# Altium footprint library PcbLib1.PcbLib: 83 footprints (part 2 of 6)
Each footprint in its own frame and in the unit in brackets; x right, y up, seen from the top. Pads: shape width x height; smd on the part's side, far side on the other; paste and mask are expansions set on the pad; w line width, h text height; cw(c..) or ccw(c..) is an arc to the next point about the centre after c.
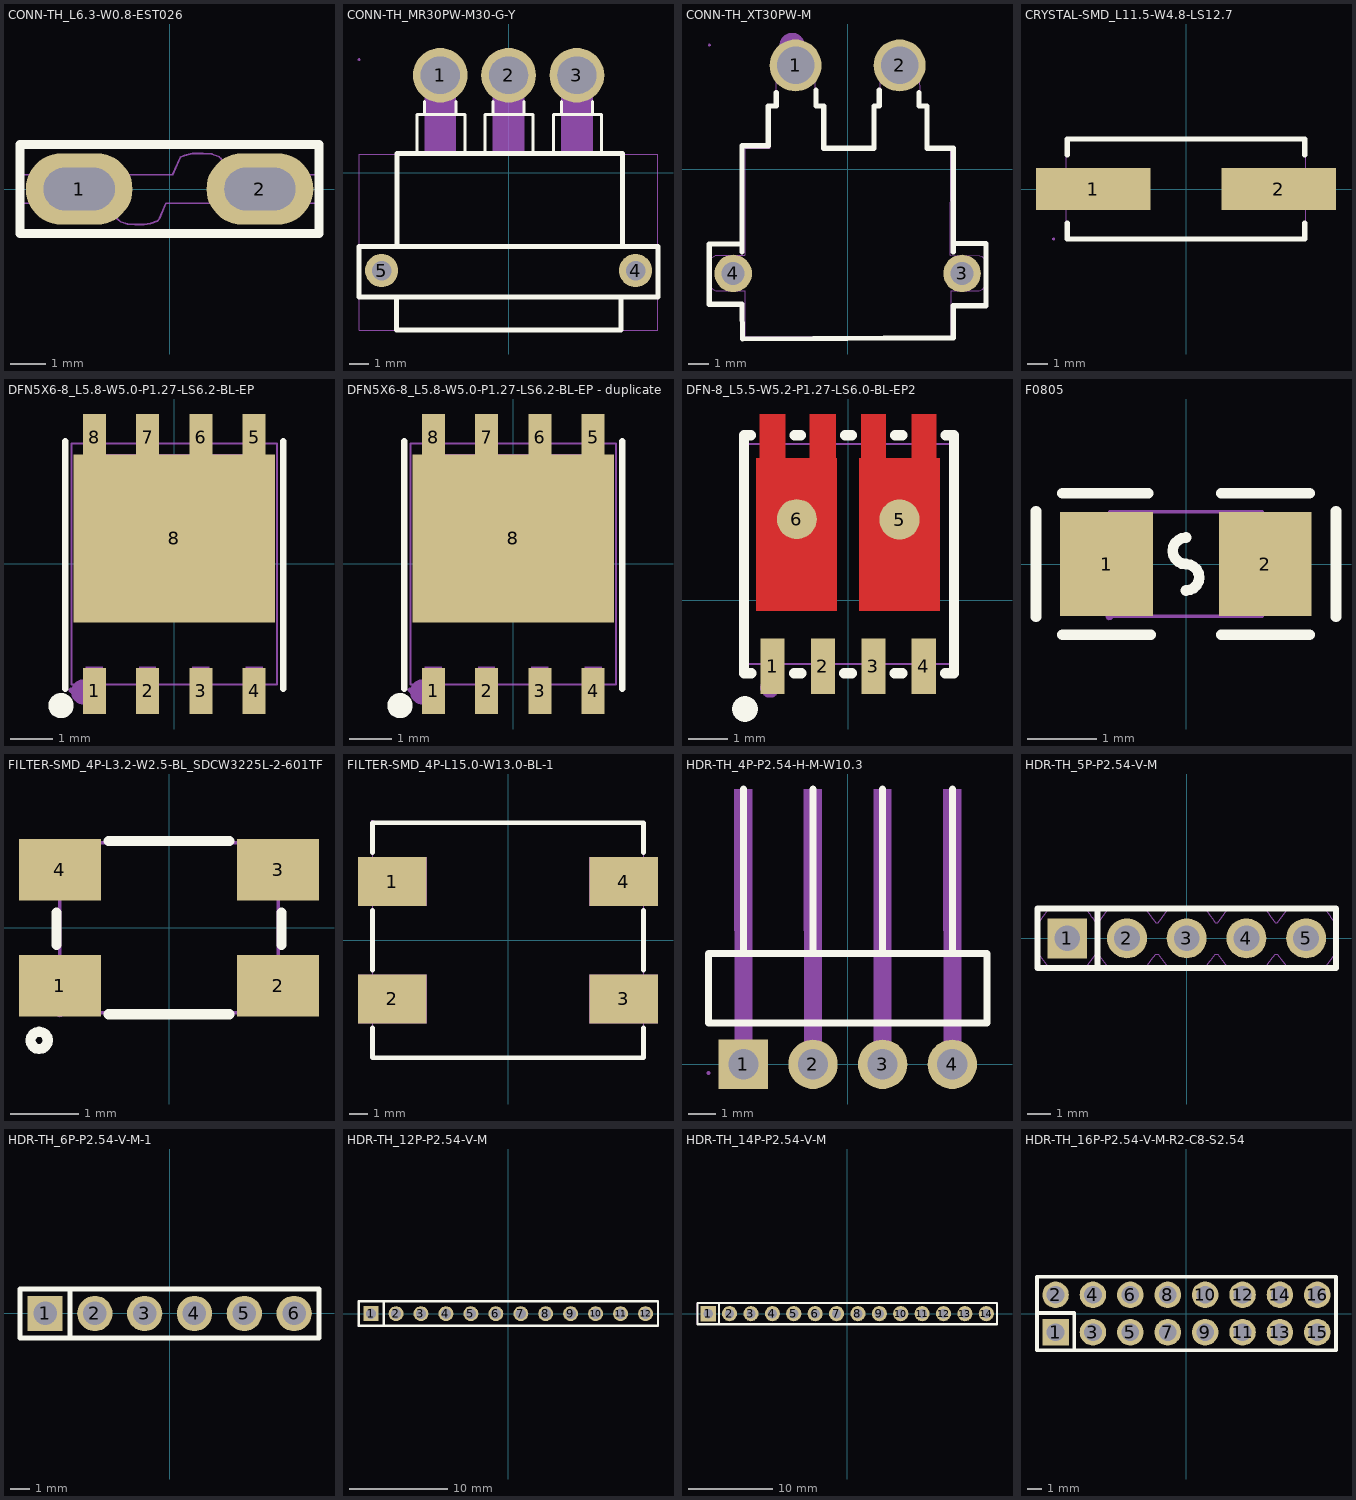
[diagram p1: the footprints below, top view; thin cyan lines are the x and y axes]

## CONN-TH_L6.3-W0.8-EST026 [mm]
pads (2):
  oval 3x1.999 hole 1.199 slot 1.999 at 0 deg: 1(-2.54,0) 2(2.54,0)
Top Overlay:
  lines w0.254: -4.199,-1.25 4.201,-1.25 4.201,1.25 -4.199,1.25 -4.199,-1.25
Mechanical 7:
  lines w0.051: -4.176,-0.401 -1.661,-0.401 -1.651,-0.411 -1.46,-0.851 -1.379,-0.919 -1.29,-0.95 -1.181,-0.98 -0.98,-1.001 -0.709,-1.001 -0.541,-0.97 -0.34,-0.902 -0.279,-0.831 -0.109,-0.411 -0.089,-0.401 4.176,-0.401 4.176,0.399 1.651,0.399 1.45,0.848 1.4,0.899 1.359,0.919 1.191,0.98 0.95,0.998 0.64,0.998 0.419,0.94 0.3,0.889 0.081,0.399 -4.176,0.399 -4.176,-0.401
Mechanical 8:
  region: -4.115,-1.001 -4.125,-1.034 -4.15,-1.054 -4.183,-1.059 -4.214,-1.046 -4.232,-1.019 -4.232,-0.983 -4.214,-0.955 -4.183,-0.942 -4.15,-0.945 -4.125,-0.968
Mechanical 9:
  region: -3.139,-0.401 -3.139,0.399 -1.941,0.399 -1.941,-0.401
  region: 1.941,-0.401 1.941,0.399 3.139,0.399 3.139,-0.401

## CONN-TH_MR30PW-M30-G-Y [mm]
pads (5):
  round 2.8 hole 1.9 slot 1.995 at 0 deg paste+0 mask+0.05: 1(-3.5,5) 2(0,5) 3(3.5,5)
  round 1.7 hole 1 paste+0 mask+0.05: 4(6.5,-5) 5(-6.5,-5)
Top Overlay:
  lines w0.152: -4.7,1 -4.7,3 -2.242,3 -2.242,1 ; -4.293,3 -4.293,3.65 ; -2.7,3.65 -2.7,3 -2.675,3 ; -1.2,1 -1.2,3 1.257,3 1.257,1 ; -0.793,3 -0.793,3.65 ; 0.8,3.65 0.8,3 0.825,3 ; 2.3,1 2.3,3 4.758,3 4.758,1 ; 2.707,3 2.707,3.65 ; 4.3,3.65 4.3,3 4.325,3
  lines w0.254: -7.65,-3.763 -7.65,-6.35 7.65,-6.35 7.65,-3.763 -7.62,-3.763 ; -5.75,-6.35 -5.75,-8.05 5.75,-8.05 5.75,-6.35 ; -5.715,-3.763 -5.715,1 -4.7,1 4.758,1 5.842,1 5.842,-3.763
Mechanical 7:
  lines w0.051: -7.65,-8.05 7.65,-8.05 7.65,0.95 -7.65,0.95 -7.65,-8.05
Mechanical 8:
  region: -7.65,5.74 -7.675,5.74 -7.71,5.775 -7.71,5.825 -7.675,5.86 -7.65,5.86 -7.625,5.86 -7.59,5.825 -7.59,5.775 -7.625,5.74 -7.65,5.74
Mechanical 9:
  region: 3.5,4.2 3.395,4.2 3.191,4.254 3.009,4.36 2.86,4.509 2.754,4.691 2.7,4.895 2.7,5.105 2.754,5.309 2.86,5.491 3.009,5.64 3.191,5.746 3.395,5.8 3.5,5.8 3.605,5.8 3.809,5.746 3.991,5.64 4.14,5.491 4.245,5.309 4.3,5.105 4.3,4.895 4.245,4.691 4.14,4.509 3.991,4.36 3.809,4.254 3.605,4.2 3.5,4.2
  region: 0,4.2 -0.105,4.2 -0.309,4.254 -0.491,4.36 -0.64,4.509 -0.746,4.691 -0.8,4.895 -0.8,5.105 -0.746,5.309 -0.64,5.491 -0.491,5.64 -0.309,5.746 -0.105,5.8 0,5.8 0.105,5.8 0.309,5.746 0.491,5.64 0.64,5.491 0.746,5.309 0.8,5.105 0.8,4.895 0.746,4.691 0.64,4.509 0.491,4.36 0.309,4.254 0.105,4.2 0,4.2
  region: -3.5,4.2 -3.605,4.2 -3.809,4.254 -3.991,4.36 -4.14,4.509 -4.246,4.691 -4.3,4.895 -4.3,5.105 -4.246,5.309 -4.14,5.491 -3.991,5.64 -3.809,5.746 -3.605,5.8 -3.5,5.8 -3.395,5.8 -3.191,5.746 -3.009,5.64 -2.86,5.491 -2.755,5.309 -2.7,5.105 -2.7,4.895 -2.755,4.691 -2.86,4.509 -3.009,4.36 -3.191,4.254 -3.395,4.2 -3.5,4.2
  region: 6.5,-5.4 6.421,-5.4 6.274,-5.339 6.161,-5.227 6.1,-5.08 6.1,-4.92 6.161,-4.773 6.274,-4.661 6.421,-4.6 6.5,-4.6 6.58,-4.6 6.727,-4.661 6.839,-4.773 6.9,-4.92 6.9,-5.08 6.839,-5.227 6.727,-5.339 6.58,-5.4 6.5,-5.4
  region: -6.5,-5.4 -6.58,-5.4 -6.727,-5.339 -6.839,-5.227 -6.9,-5.08 -6.9,-4.92 -6.839,-4.773 -6.727,-4.661 -6.58,-4.6 -6.5,-4.6 -6.421,-4.6 -6.274,-4.661 -6.161,-4.773 -6.1,-4.92 -6.1,-5.08 -6.161,-5.227 -6.274,-5.339 -6.421,-5.4 -6.5,-5.4
Mechanical 10:
  region: -2.7,5.8 -4.3,5.8 -4.3,0.9 -2.7,0.9
  region: 0.8,5.8 -0.8,5.8 -0.8,0.9 0.8,0.9
  region: 4.3,5.8 2.7,5.8 2.7,0.9 4.3,0.9

## CONN-TH_XT30PW-M [mm]
pads (4):
  round 2.5 hole 1.8 paste+0.051: 1(-2.5,5) 2(2.5,5)
  round 1.8 hole 1.1 paste+0.051: 3(5.5,-5) 4(-5.5,-5)
Top Overlay:
  lines w0.254: -5.08,-3.95 -5.08,0.047 -5.08,1.143 -3.81,1.143 -3.81,3.048 -3.429,3.048 -3.429,3.683 ; -5.08,-3.585 -6.65,-3.585 -6.65,-6.48 -5.08,-6.48 -5.05,-8.15 5.08,-8.091 5.08,-6.549 ; -1.524,3.81 -1.524,3.048 -1.143,3.048 -1.143,1.016 1.27,1.016 1.27,3.048 1.524,3.048 1.524,3.81 ; 3.429,3.683 3.429,3.048 3.81,3.048 3.81,1.016 5.08,1.016 5.08,0.047 5.08,-3.95 ; 5.08,-6.55 6.65,-6.55 6.65,-3.559 5.08,-3.559
Mechanical 6:
  circle w0.6: c-2.667,5.969 r0.3
Mechanical 7:
  lines w0.051: -6.65,-5.44 -6.65,-4.515 -6.638,-4.442 -6.61,-4.358 -6.561,-4.275 -6.501,-4.217 -6.414,-4.166 -6.335,-4.135 -4.948,-4.129 -4.955,1.025 -3.741,1.02 -3.748,3.02 -3.451,3.017 -3.451,5.092 -3.42,5.253 -3.371,5.397 -3.351,5.436 -3.351,5.437 -3.305,5.543 -3.187,5.665 -3.084,5.774 -2.947,5.858 -2.81,5.919 -2.665,5.963 -2.489,5.97 -2.348,5.959 -2.195,5.919 -2.046,5.856 -1.914,5.769 -1.803,5.66 -1.695,5.535 -1.627,5.391 -1.58,5.246 -1.548,5.098 -1.55,3.019 -1.249,3.019 -1.25,1.018 1.256,1.021 1.251,3.019 1.553,3.022 1.548,5.092 1.58,5.254 1.631,5.405 1.702,5.543 1.799,5.659 1.921,5.772 2.052,5.859 2.182,5.919 2.338,5.96 2.489,5.971 2.66,5.961 2.815,5.917 2.947,5.861 3.077,5.769 3.206,5.656 3.3,5.54 3.367,5.403 3.419,5.257 3.452,5.104 3.459,3.022 3.74,3.018 3.752,1.017 4.95,1.023 4.941,-4.132 6.343,-4.139 6.448,-4.176 6.492,-4.214 6.57,-4.298 6.644,-4.43 6.65,-4.549 6.65,-5.419 6.65,-5.51 6.611,-5.601 6.554,-5.686 6.493,-5.75 6.415,-5.793 6.333,-5.82 6.25,-5.833 4.948,-5.832 4.953,-8.047 -4.94,-8.05 -4.954,-5.827 -6.251,-5.83 -6.345,-5.823 -6.429,-5.788 -6.507,-5.736 -6.565,-5.683 -6.614,-5.592 -6.641,-5.518 -6.65,-5.44
Mechanical 8:
  region: -6.65,6.031 -6.625,6.031 -6.59,5.996 -6.59,5.946 -6.625,5.911 -6.65,5.911 -6.675,5.911 -6.71,5.946 -6.71,5.996 -6.675,6.031 -6.65,6.031
Mechanical 9:
  region: 5.5,-4.625 5.575,-4.625 5.712,-4.682 5.818,-4.788 5.875,-4.925 5.875,-5.075 5.818,-5.212 5.712,-5.318 5.575,-5.375 5.5,-5.375 5.425,-5.375 5.288,-5.318 5.182,-5.212 5.125,-5.075 5.125,-4.925 5.182,-4.788 5.288,-4.682 5.425,-4.625 5.5,-4.625
  region: -5.5,-4.625 -5.425,-4.625 -5.288,-4.682 -5.182,-4.788 -5.125,-4.925 -5.125,-5.075 -5.182,-5.212 -5.288,-5.318 -5.425,-5.375 -5.5,-5.375 -5.575,-5.375 -5.712,-5.318 -5.818,-5.212 -5.875,-5.075 -5.875,-4.925 -5.818,-4.788 -5.712,-4.682 -5.575,-4.625 -5.5,-4.625
  region: 2.5,5.65 2.586,5.65 2.751,5.606 2.899,5.52 3.02,5.399 3.106,5.251 3.15,5.086 3.15,4.914 3.106,4.749 3.02,4.601 2.899,4.48 2.751,4.394 2.586,4.35 2.5,4.35 2.414,4.35 2.249,4.394 2.101,4.48 1.98,4.601 1.894,4.749 1.85,4.914 1.85,5.086 1.894,5.251 1.98,5.399 2.101,5.52 2.249,5.606 2.414,5.65 2.5,5.65
  region: -2.5,5.65 -2.414,5.65 -2.249,5.606 -2.101,5.52 -1.98,5.399 -1.894,5.251 -1.85,5.086 -1.85,4.914 -1.894,4.749 -1.98,4.601 -2.101,4.48 -2.249,4.394 -2.414,4.35 -2.5,4.35 -2.586,4.35 -2.751,4.394 -2.899,4.48 -3.02,4.601 -3.106,4.749 -3.15,4.914 -3.15,5.086 -3.106,5.251 -3.02,5.399 -2.899,5.52 -2.751,5.606 -2.586,5.65 -2.5,5.65

## CRYSTAL-SMD_L11.5-W4.8-LS12.7 [mm]
pads (2):
  rect 5.5x2 smd paste+0.051: 1(-4.45,0) 2(4.45,0)
Top Overlay:
  lines w0.254: -5.7,-1.65 -5.7,-2.4 5.7,-2.4 5.7,-1.65 ; -5.7,1.65 -5.7,2.4 5.7,2.4 5.7,1.65
Mechanical 7:
  lines w0.051: -5.75,-2.4 5.75,-2.4 5.75,2.4 -5.75,2.4 -5.75,-2.4
Mechanical 8:
  region: -6.29,-2.4 -6.29,-2.425 -6.325,-2.46 -6.375,-2.46 -6.41,-2.425 -6.41,-2.4 -6.41,-2.375 -6.375,-2.34 -6.325,-2.34 -6.29,-2.375 -6.29,-2.4
Mechanical 9:
  region: -6.35,0.4 -1.85,0.4 -1.85,-0.4 -6.35,-0.4
  region: 6.35,-0.4 1.85,-0.4 1.85,0.4 6.35,0.4

## DFN5X6-8_L5.8-W5.0-P1.27-LS6.2-BL-EP [mm]
pads (9):
  rect 0.55x1.1 smd paste-100 mask+0.05: 1(-1.905,-3.025) 2(-0.635,-3.025) 3(0.635,-3.025) 4(1.905,-3.025) 5(1.905,3.025) 6(0.635,3.025) 7(-0.635,3.025) 8(-1.905,3.025)
  rect 4.8x4 smd paste-100 mask+0.05: 8(0,0.61)
Top Overlay:
  circle w0.3: c-2.7,-3.375 r0.15
  lines w0.152: -2.6,-2.975 -2.6,2.925 ; 2.6,-2.975 2.6,2.925
Top Paste:
  region: 0.91,2.61 0.91,3.575 0.36,3.575 0.36,2.61 -0.36,2.61 -0.36,3.575 -0.91,3.575 -0.91,2.61 -1.63,2.61 -1.63,3.575 -2.18,3.575 -2.18,2.61 -2.4,2.61 -2.4,-1.39 2.4,-1.39 2.4,2.61 2.18,2.61 2.18,3.575 1.63,3.575 1.63,2.61
  region: 2.18,-3.575 2.18,-2.475 1.63,-2.475 1.63,-3.575
  region: -2.18,-2.475 -2.18,-3.575 -1.63,-3.575 -1.63,-2.475
  region: 0.91,-3.575 0.91,-2.475 0.36,-2.475 0.36,-3.575
  region: -0.36,-3.575 -0.36,-2.475 -0.91,-2.475 -0.91,-3.575
Mechanical 6:
  circle w0.3: c-2.159,-3.048 r0.15
Mechanical 7:
  lines w0.051: -2.45,-2.875 -2.45,2.875 2.45,2.875 2.45,-2.875 -2.45,-2.875
Mechanical 8:
  region: -2.39,-3.005 -2.39,-3.03 -2.425,-3.065 -2.475,-3.065 -2.51,-3.03 -2.51,-3.005 -2.51,-2.98 -2.475,-2.945 -2.425,-2.945 -2.39,-2.98 -2.39,-3.005
Mechanical 9:
  region: -2.105,3.045 -1.705,3.045 -1.705,2.495 -2.105,2.495
  region: -0.835,3.045 -0.435,3.045 -0.435,2.495 -0.835,2.495
  region: 0.435,3.045 0.835,3.045 0.835,2.495 0.435,2.495
  region: 1.705,3.045 2.105,3.045 2.105,2.495 1.705,2.495
  region: -2.1,2.61 2.1,2.61 2.1,-1.09 -2.1,-1.09
  region: -1.705,-3.005 -2.105,-3.005 -2.105,-2.455 -1.705,-2.455
  region: -0.435,-3.005 -0.835,-3.005 -0.835,-2.455 -0.435,-2.455
  region: 0.835,-3.005 0.435,-3.005 0.435,-2.455 0.835,-2.455
  region: 2.105,-3.005 1.705,-3.005 1.705,-2.455 2.105,-2.455

## DFN5X6-8_L5.8-W5.0-P1.27-LS6.2-BL-EP - duplicate [mm]
pads (9):
  rect 0.55x1.1 smd paste-100 mask+0.05: 1(-1.905,-3.025) 2(-0.635,-3.025) 3(0.635,-3.025) 4(1.905,-3.025) 5(1.905,3.025) 6(0.635,3.025) 7(-0.635,3.025) 8(-1.905,3.025)
  rect 4.8x4 smd paste-100 mask+0.05: 8(0,0.61)
Top Overlay:
  circle w0.3: c-2.7,-3.375 r0.15
  lines w0.152: -2.6,-2.975 -2.6,2.925 ; 2.6,-2.975 2.6,2.925
Top Paste:
  region: 0.91,2.61 0.91,3.575 0.36,3.575 0.36,2.61 -0.36,2.61 -0.36,3.575 -0.91,3.575 -0.91,2.61 -1.63,2.61 -1.63,3.575 -2.18,3.575 -2.18,2.61 -2.4,2.61 -2.4,-1.39 2.4,-1.39 2.4,2.61 2.18,2.61 2.18,3.575 1.63,3.575 1.63,2.61
  region: 2.18,-3.575 2.18,-2.475 1.63,-2.475 1.63,-3.575
  region: -2.18,-2.475 -2.18,-3.575 -1.63,-3.575 -1.63,-2.475
  region: 0.91,-3.575 0.91,-2.475 0.36,-2.475 0.36,-3.575
  region: -0.36,-3.575 -0.36,-2.475 -0.91,-2.475 -0.91,-3.575
Mechanical 2:
  circle w0.3: c-2.159,-3.048 r0.15
Mechanical 6:
  lines w0.051: -2.45,-2.875 -2.45,2.875 2.45,2.875 2.45,-2.875 -2.45,-2.875
Mechanical 8:
  region: -2.39,-3.005 -2.39,-3.009 -2.391,-3.019 -2.394,-3.028 -2.399,-3.036 -2.404,-3.044 -2.411,-3.051 -2.419,-3.056 -2.427,-3.06 -2.436,-3.063 -2.445,-3.065 -2.455,-3.065 -2.464,-3.063 -2.473,-3.06 -2.481,-3.056 -2.489,-3.051 -2.496,-3.044 -2.501,-3.036 -2.506,-3.028 -2.509,-3.019 -2.51,-3.009 -2.51,-3.005 -2.51,-3 -2.509,-2.991 -2.506,-2.982 -2.501,-2.973 -2.496,-2.966 -2.489,-2.959 -2.481,-2.953 -2.473,-2.949 -2.464,-2.946 -2.455,-2.945 -2.445,-2.945 -2.436,-2.946 -2.427,-2.949 -2.419,-2.953 -2.411,-2.959 -2.404,-2.966 -2.399,-2.973 -2.394,-2.982 -2.391,-2.991 -2.39,-3 -2.39,-3.005
Mechanical 9:
  region: -2.105,3.045 -1.705,3.045 -1.705,2.495 -2.105,2.495
  region: -0.835,3.045 -0.435,3.045 -0.435,2.495 -0.835,2.495
  region: 0.435,3.045 0.835,3.045 0.835,2.495 0.435,2.495
  region: 1.705,3.045 2.105,3.045 2.105,2.495 1.705,2.495
  region: -2.1,2.61 2.1,2.61 2.1,-1.09 -2.1,-1.09
  region: -1.705,-3.005 -2.105,-3.005 -2.105,-2.455 -1.705,-2.455
  region: -0.435,-3.005 -0.835,-3.005 -0.835,-2.455 -0.435,-2.455
  region: 0.835,-3.005 0.435,-3.005 0.435,-2.455 0.835,-2.455
  region: 2.105,-3.005 1.705,-3.005 1.705,-2.455 2.105,-2.455

## DFN-8_L5.5-W5.2-P1.27-LS6.0-BL-EP2 [mil]
pads (6):
  rect 24x55 smd: 1(-75,-65.3) 2(-25,-65.3) 3(25,-65.3) 4(75,-65.3)
  round 39.8 smd: 5(51,80.2)
  round 39.7 smd: 6(-51,80.6)
Top Layer:
  region: -91.1,-10.1 -91.1,140.9 -87.6,140.9 -87.6,184.9 -62.5,184.9 -62.5,140.9 -37.9,140.9 -37.9,184.9 -12.3,184.9 -12.3,140.9 -11.3,140.9 -11.3,-10.1
  region: 11.2,-10.1 11.2,140.9 12.8,140.9 12.8,184.9 37.3,184.9 37.3,140.9 62.9,140.9 62.9,184.9 87.5,184.9 87.5,140.9 91.1,140.9 91.1,-10.1
Top Overlay:
  lines w10: -96.7,163.8 -103.5,163.8 -103.5,-72.4 -96.1,-72.4 ; -53.9,-72.4 -46.1,-72.4 ; -53.4,163.8 -47,163.8 ; -3.9,-72.4 3.9,-72.4 ; -3.2,163.8 3.7,163.8 ; 46.1,-72.4 53.9,-72.4 ; 46.4,163.8 53.8,163.8 ; 96.1,-72.4 103.5,-72.4 ; 96.6,163.8 105,163.8 105,-72.4
  lines w15.7: -97.5,-107.9 -97.9,-109.8 -99,-111.3 -100.6,-112.4 -102.5,-112.8 -104.3,-112.4 -105.9,-111.3 -107,-109.7 -107.3,-107.9 -107,-106 -105.9,-104.4 -104.3,-103.3 -102.5,-103 -100.6,-103.3 -99,-104.4 -97.9,-105.9 -97.5,-107.8
Mechanical 6:
  lines w10: -82.6,-86.6 -82.2,-84.6 -81.1,-83 -79.5,-81.9 -77.6,-81.6 -75.7,-81.9 -74.1,-83 -73,-84.6 -72.6,-86.6 -73,-88.5 -74.1,-90.1 -75.7,-91.2 -77.6,-91.6 -79.5,-91.2 -81.1,-90.1 -82.2,-88.5 -82.6,-86.6
Mechanical 7:
  lines w2: -102.4,-63.3 102.3,-63.3 102.3,155.2 -102.4,155.2 -102.4,-63.3
Mechanical 8:
  region: -100,-73.2 -100.4,-74.5 -101.4,-75.3 -102.7,-75.5 -103.9,-75 -104.7,-73.8 -104.7,-72.5 -103.9,-71.4 -102.7,-70.8 -101.4,-71 -100.4,-71.9
Mechanical 9:
  region: 67.1,-51.5 82.8,-51.5 82.8,-73.2 67.1,-73.2
  region: 17.1,-51.5 32.8,-51.5 32.8,-73.2 17.1,-73.2
  region: -32.9,-51.5 -17.2,-51.5 -17.2,-73.2 -32.9,-73.2
  region: -82.9,-51.5 -67.2,-51.5 -67.2,-73.2 -82.9,-73.2
  region: -85.7,-10.1 -85.7,140.9 -83.1,140.9 -83.1,165 -67.4,165 -67.4,140.9 -33.1,140.9 -33.1,165 -17.4,165 -17.4,140.9 -11.8,140.9 -11.8,-10.1
  region: 11.8,-10.1 11.8,140.9 16.9,140.9 16.9,165 32.6,165 32.6,140.9 66.9,140.9 66.9,165 82.6,165 82.6,140.9 85.6,140.9 85.6,-10.1

## F0805 [mil]
pads (2):
  rect 52.6x59.1 smd paste-3937 mask+2: 1(-45,0) 2(44.9,0)
Top Overlay:
  lines w6: -85,-30 -85,30 ; -70,-40 -20,-40 ; -70,40 -21.5,40 ; 0,-15 2.3,-14.7 4.4,-13.6 6,-11.9 7.1,-9.9 7.5,-7.5 7.1,-5.2 6,-3.1 4.4,-1.5 2.3,-0.4 0,0 -2.4,0.3 -4.4,1.4 -6.1,3.1 -7.2,5.1 -7.5,7.5 -7.2,9.8 -6.1,11.9 -4.4,13.5 -2.4,14.6 0,15 ; 20,-40 70,-40 ; 20,40 70,40 ; 85,-30 85,30
Top Paste:
  region: 18.7,-24.4 18.7,-7.9 36.2,-7.9 36.2,9.8 18.9,9.8 18.7,25.9 20.6,27.9 65.9,27.9 67.9,25.9 67.9,-24.4 65.9,-26.4 20.6,-26.4
  region: -66,-24.4 -66,25.9 -64,27.9 -18.7,27.9 -16.8,25.9 -16.6,9.8 -34.3,9.8 -34.3,-7.9 -17,-7.9 -16.8,-24.4 -18.7,-26.4 -64,-26.4
Mechanical 7:
  lines w2: -43.3,-29.6 43.3,-29.6 43.3,29.5 -43.3,29.5 -43.3,-29.6
Mechanical 8:
  region: -41,-29.6 -41.4,-30.8 -42.4,-31.7 -43.7,-31.9 -44.9,-31.3 -45.6,-30.2 -45.6,-28.9 -44.9,-27.8 -43.7,-27.2 -42.4,-27.4 -41.4,-28.3
Mechanical 9:
  region: 43.3,-29.6 35.4,-29.6 35.4,29.5 43.3,29.5
  region: -43.3,29.5 -35.5,29.5 -35.5,-29.6 -43.3,-29.6

## FILTER-SMD_4P-L3.2-W2.5-BL_SDCW3225L-2-601TF [mil]
pads (4):
  rect 47.2x35.4 smd: 1(-63,-33.5) 2(63,-33.5) 3(63,33.4) 4(-63,33.4)
Top Overlay:
  lines w5.9: -65,-10 -65,8.7 ; -35,-50 35,-50 ; -35,50 35,50 ; 65,-10 65,8.7 ; -80,-65 -79.6,-63.1 -78.5,-61.5 -76.9,-60.4 -75,-60 -73.1,-60.4 -71.4,-61.5 -70.3,-63.1 -70,-65 -70.3,-66.9 -71.4,-68.6 -73.1,-69.7 -75,-70 -76.9,-69.7 -78.5,-68.6 -79.6,-66.9 -80,-65
Mechanical 7:
  lines w2: -63,-49.2 63,-49.2 63,49.2 -63,49.2 -63,-49.2
Mechanical 8:
  region: -60.6,-49.2 -61,-50.5 -62,-51.4 -63.3,-51.6 -64.5,-51 -65.2,-49.9 -65.2,-48.6 -64.5,-47.5 -63.3,-46.9 -62,-47.1 -61,-48
Mechanical 9:
  region: 39.4,17.7 39.4,49.2 63,49.2 63,17.7
  region: 39.4,-49.2 39.4,-17.7 63,-17.7 63,-49.2
  region: -63,-49.2 -63,-17.7 -39.3,-17.7 -39.3,-49.2
  region: -63,17.7 -63,49.2 -39.3,49.2 -39.3,17.7

## FILTER-SMD_4P-L15.0-W13.0-BL-1 [mil]
pads (4):
  rect 149.6x106.3 smd: 1(-252,128) 2(-252,-127.9) 3(251.9,-127.9) 4(251.9,128)
Top Overlay:
  lines w10: -295.3,-190.2 -295.3,-255.9 295.2,-255.9 295.2,-190.2 ; -295.3,-65.7 -295.3,65.7 ; -295.3,190.2 -295.3,255.9 295.2,255.9 295.2,190.2 ; 295.2,-65.7 295.2,65.7
Mechanical 7:
  lines w2: -295.1,-255 295.5,-255 295.5,256.8 -295.1,256.8 -295.1,-255
Mechanical 8:
  region: -290.3,256.7 -290.7,254.9 -291.7,253.4 -293.2,252.4 -295,252 -296.9,252.4 -298.4,253.4 -299.4,254.9 -299.8,256.7 -299.4,258.5 -298.4,260.1 -296.9,261.1 -295,261.4 -293.2,261.1 -291.7,260.1 -290.7,258.5
Mechanical 9:
  region: -326.8,-74.8 -177.2,-74.8 -177.2,-181.1 -326.8,-181.1
  region: 177.1,-74.8 326.7,-74.8 326.7,-181.1 177.1,-181.1
  region: 177.1,181.1 326.7,181.1 326.7,74.8 177.1,74.8
  region: -326.8,181.1 -177.2,181.1 -177.2,74.8 -326.8,74.8

## HDR-TH_4P-P2.54-H-M-W10.3 [mm]
pads (4):
  rect 1.8x1.8 hole 1.1 paste+0.051: 1(-3.81,0)
  round 1.8 hole 1.1 paste+0.051: 2(-1.27,0) 3(1.27,0) 4(3.81,0)
Top Overlay:
  lines w0.254: -3.81,4.04 -3.81,10.04 ; -1.27,4.04 -1.27,10.04 ; 1.27,4.04 1.27,10.04 ; 3.81,4.04 3.81,10.04 ; -5.08,1.5 -5.08,4.04 5.08,4.04 5.08,1.5 -5.08,1.5
Mechanical 6:
  region: 3.48,10.04 4.13,10.04 4.13,3.94 3.49,3.94
  region: 0.94,10.04 1.59,10.04 1.59,3.94 0.95,3.94
  region: -1.6,10.04 -0.95,10.04 -0.95,3.94 -1.59,3.94
  region: -4.14,10.04 -3.49,10.04 -3.49,3.94 -4.13,3.94
Mechanical 7:
  lines w0.051: -5.08,1.5 5.08,1.5 5.08,4.04 -5.08,4.04 -5.08,1.5
Mechanical 8:
  region: -5.14,-0.32 -5.14,-0.295 -5.105,-0.26 -5.055,-0.26 -5.02,-0.295 -5.02,-0.32 -5.02,-0.345 -5.055,-0.38 -5.105,-0.38 -5.14,-0.345 -5.14,-0.32
Mechanical 9:
  region: 3.49,0.32 4.13,0.32 4.13,-0.32 3.49,-0.32
  region: 0.95,0.32 1.59,0.32 1.59,-0.32 0.95,-0.32
  region: -1.59,0.32 -0.95,0.32 -0.95,-0.32 -1.59,-0.32
  region: -4.13,0.32 -3.49,0.32 -3.49,-0.32 -4.13,-0.32
Mechanical 10:
  region: 3.49,-0.32 4.13,-0.32 4.13,10.04 3.48,10.04
  region: 0.95,-0.32 1.59,-0.32 1.59,10.04 0.94,10.04
  region: -1.59,-0.32 -0.95,-0.32 -0.95,10.04 -1.6,10.04
  region: -4.13,-0.32 -3.49,-0.32 -3.49,10.04 -4.14,10.04

## HDR-TH_5P-P2.54-V-M [mm]
pads (5):
  rect 1.699x1.699 hole 1.1: 1(-5.08,0)
  round 1.699 hole 1.1: 2(-2.54,0) 3(0,0) 4(2.54,0) 5(5.08,0)
Top Overlay:
  lines w0.254: -3.787,-1.27 -3.787,1.27 ; -6.35,-1.27 -6.35,1.27 6.35,1.27 6.35,-1.27 -6.35,-1.27
Mechanical 7:
  lines w0.051: -6.35,-0.671 -6.35,0.671 -6.299,0.671 -6.027,1.031 -5.85,1.27 -4.31,1.27 -4.148,1.059 -4.049,0.925 -4.016,0.884 -3.861,0.671 -3.759,0.671 -3.31,1.27 -1.77,1.27 -1.631,1.087 -1.547,0.975 -1.458,0.859 -1.435,0.828 -1.417,0.8 -1.321,0.671 -1.219,0.671 -0.77,1.27 0.77,1.27 0.869,1.143 1.011,0.955 1.107,0.82 1.135,0.782 1.219,0.671 1.321,0.671 1.77,1.27 3.31,1.27 3.459,1.077 3.533,0.98 3.759,0.671 3.861,0.671 4.31,1.27 5.85,1.27 6.081,0.97 6.111,0.925 6.299,0.671 6.35,0.671 6.35,-0.671 6.299,-0.671 6.076,-0.975 5.85,-1.27 4.31,-1.27 3.861,-0.671 3.759,-0.671 3.581,-0.912 3.546,-0.963 3.51,-1.008 3.31,-1.27 1.77,-1.27 1.321,-0.671 1.219,-0.671 1.021,-0.942 0.991,-0.98 0.77,-1.27 -0.77,-1.27 -1.219,-0.671 -1.321,-0.671 -1.504,-0.919 -1.542,-0.973 -1.77,-1.27 -3.31,-1.27 -3.759,-0.671 -3.861,-0.671 -4.077,-0.965 -4.31,-1.27 -5.85,-1.27 -6.299,-0.671 -6.35,-0.671
Mechanical 8:
  region: -6.289,-1.27 -6.299,-1.303 -6.325,-1.326 -6.358,-1.331 -6.388,-1.316 -6.408,-1.288 -6.408,-1.255 -6.388,-1.224 -6.358,-1.212 -6.325,-1.217 -6.299,-1.24
Mechanical 9:
  region: -5.4,0.32 -4.76,0.32 -4.76,-0.32 -5.4,-0.32
  region: -2.86,0.32 -2.22,0.32 -2.22,-0.32 -2.86,-0.32
  region: -0.32,0.32 0.32,0.32 0.32,-0.32 -0.32,-0.32
  region: 2.22,0.32 2.86,0.32 2.86,-0.32 2.22,-0.32
  region: 4.76,0.32 5.4,0.32 5.4,-0.32 4.76,-0.32

## HDR-TH_6P-P2.54-V-M-1 [mm]
pads (6):
  rect 1.801x1.801 hole 1.199: 1(-6.35,0)
  round 1.801 hole 1.199: 2(-3.81,0) 3(-1.27,0) 4(1.27,0) 5(3.81,0) 6(6.35,0)
Top Overlay:
  lines w0.254: -5.08,-1.25 -5.08,1.252 ; -7.62,-1.25 -7.62,1.25 7.62,1.25 7.62,-1.25 -7.62,-1.25
Mechanical 7:
  lines w0.051: -7.62,-1.25 -7.62,1.25 7.62,1.25 7.62,-1.25 -7.62,-1.25
Mechanical 8:
  region: -7.559,-1.25 -7.569,-1.283 -7.595,-1.306 -7.628,-1.308 -7.661,-1.295 -7.678,-1.267 -7.678,-1.232 -7.661,-1.204 -7.628,-1.191 -7.595,-1.196 -7.569,-1.217
Mechanical 9:
  region: 6.03,0.32 6.67,0.32 6.67,-0.32 6.03,-0.32
  region: 3.49,0.32 4.13,0.32 4.13,-0.32 3.49,-0.32
  region: 0.95,0.32 1.59,0.32 1.59,-0.32 0.95,-0.32
  region: -1.59,0.32 -0.95,0.32 -0.95,-0.32 -1.59,-0.32
  region: -4.13,0.32 -3.49,0.32 -3.49,-0.32 -4.13,-0.32
  region: -6.67,0.32 -6.03,0.32 -6.03,-0.32 -6.67,-0.32

## HDR-TH_12P-P2.54-V-M [mil]
pads (12):
  rect 60x60 hole 41.34 paste+2: 1(-550,0)
  round 60 hole 41.34 paste+2: 2(-450,0) 3(-350,0) 4(-250,0) 5(-150,0) 6(-50,0) 7(50,0) 8(150,0) 9(250,0) 10(350,0) 11(450,0) 12(550,0)
Top Overlay:
  lines w10: -500,-49.21 -500,49.21 ; -600,-49.21 -600,49.21 600,49.21 600,-49.21 -600,-49.21
Mechanical 7:
  lines w2: -600,-49.21 600,-49.21 600,49.21 -600,49.21 -600,-49.21
Mechanical 8:
  region: -597.64,-49.21 -597.64,-50.19 -599.02,-51.57 -600.98,-51.57 -602.36,-50.19 -602.36,-49.21 -602.36,-48.23 -600.98,-46.85 -599.02,-46.85 -597.64,-48.23 -597.64,-49.21
Mechanical 9:
  region: 537.4,12.6 562.6,12.6 562.6,-12.6 537.4,-12.6
  region: 437.4,12.6 462.6,12.6 462.6,-12.6 437.4,-12.6
  region: 337.4,12.6 362.6,12.6 362.6,-12.6 337.4,-12.6
  region: 237.4,12.6 262.6,12.6 262.6,-12.6 237.4,-12.6
  region: 137.4,12.6 162.6,12.6 162.6,-12.6 137.4,-12.6
  region: 37.4,12.6 62.6,12.6 62.6,-12.6 37.4,-12.6
  region: -62.6,12.6 -37.4,12.6 -37.4,-12.6 -62.6,-12.6
  region: -162.6,12.6 -137.4,12.6 -137.4,-12.6 -162.6,-12.6
  region: -262.6,12.6 -237.4,12.6 -237.4,-12.6 -262.6,-12.6
  region: -362.6,12.6 -337.4,12.6 -337.4,-12.6 -362.6,-12.6
  region: -462.6,12.6 -437.4,12.6 -437.4,-12.6 -462.6,-12.6
  region: -562.6,12.6 -537.4,12.6 -537.4,-12.6 -562.6,-12.6

## HDR-TH_14P-P2.54-V-M [mm]
pads (14):
  rect 1.801x1.801 hole 1.1: 1(-16.51,0)
  round 1.801 hole 1.1: 2(-13.97,0) 3(-11.43,0) 4(-8.89,0) 5(-6.35,0) 6(-3.81,0) 7(-1.27,0) 8(1.27,0) 9(3.81,0) 10(6.35,0) 11(8.89,0) 12(11.43,0) 13(13.97,0) 14(16.51,0)
Top Overlay:
  lines w0.254: -15.24,-1.25 -15.24,1.25 ; -17.78,-1.25 17.78,-1.25 17.78,1.25 -17.78,1.25 -17.78,-1.25
Mechanical 7:
  lines w0.051: -17.78,-1.25 17.78,-1.25 17.78,1.25 -17.78,1.25 -17.78,-1.25
Mechanical 8:
  region: -17.719,-1.27 -17.729,-1.303 -17.755,-1.326 -17.788,-1.328 -17.818,-1.316 -17.838,-1.288 -17.838,-1.252 -17.818,-1.224 -17.788,-1.212 -17.755,-1.217 -17.729,-1.237
Mechanical 9:
  region: -16.83,0.32 -16.19,0.32 -16.19,-0.32 -16.83,-0.32
  region: -14.29,0.32 -13.65,0.32 -13.65,-0.32 -14.29,-0.32
  region: -11.75,0.32 -11.11,0.32 -11.11,-0.32 -11.75,-0.32
  region: -9.21,0.32 -8.57,0.32 -8.57,-0.32 -9.21,-0.32
  region: -6.67,0.32 -6.03,0.32 -6.03,-0.32 -6.67,-0.32
  region: -4.13,0.32 -3.49,0.32 -3.49,-0.32 -4.13,-0.32
  region: -1.59,0.32 -0.95,0.32 -0.95,-0.32 -1.59,-0.32
  region: 0.95,0.32 1.59,0.32 1.59,-0.32 0.95,-0.32
  region: 3.49,0.32 4.13,0.32 4.13,-0.32 3.49,-0.32
  region: 6.03,0.32 6.67,0.32 6.67,-0.32 6.03,-0.32
  region: 8.57,0.32 9.21,0.32 9.21,-0.32 8.57,-0.32
  region: 11.11,0.32 11.75,0.32 11.75,-0.32 11.11,-0.32
  region: 13.65,0.32 14.29,0.32 14.29,-0.32 13.65,-0.32
  region: 16.19,0.32 16.83,0.32 16.83,-0.32 16.19,-0.32

## HDR-TH_16P-P2.54-V-M-R2-C8-S2.54 [mm]
pads (16):
  rect 1.8x1.8 hole 1.2 paste+0.051: 1(-8.89,-1.27)
  round 1.8 hole 1.2 paste+0.051: 2(-8.89,1.27) 3(-6.35,-1.27) 4(-6.35,1.27) 5(-3.81,-1.27) 6(-3.81,1.27) 7(-1.27,-1.27) 8(-1.27,1.27) 9(1.27,-1.27) 10(1.27,1.27) 11(3.81,-1.27) 12(3.81,1.27) 13(6.35,-1.27) 14(6.35,1.27) 15(8.89,-1.27) 16(8.89,1.27)
Top Overlay:
  lines w0.254: -10.16,0.04 -7.62,0.04 -7.62,-2.5 ; -10.16,-2.5 -10.16,2.5 10.16,2.5 10.16,-2.5 -10.16,-2.5
Mechanical 7:
  lines w0.051: -10.16,-2.5 -10.16,2.5 10.16,2.5 10.16,-2.5 -10.16,-2.5
Mechanical 8:
  region: -10.1,-2.5 -10.1,-2.525 -10.135,-2.56 -10.185,-2.56 -10.22,-2.525 -10.22,-2.5 -10.22,-2.475 -10.185,-2.44 -10.135,-2.44 -10.1,-2.475 -10.1,-2.5
Mechanical 9:
  region: 8.57,1.59 9.21,1.59 9.21,0.95 8.57,0.95
  region: 8.57,-0.95 9.21,-0.95 9.21,-1.59 8.57,-1.59
  region: 6.03,1.59 6.67,1.59 6.67,0.95 6.03,0.95
  region: 6.03,-0.95 6.67,-0.95 6.67,-1.59 6.03,-1.59
  region: 3.49,1.59 4.13,1.59 4.13,0.95 3.49,0.95
  region: 3.49,-0.95 4.13,-0.95 4.13,-1.59 3.49,-1.59
  region: 0.95,1.59 1.59,1.59 1.59,0.95 0.95,0.95
  region: 0.95,-0.95 1.59,-0.95 1.59,-1.59 0.95,-1.59
  region: -1.59,1.59 -0.95,1.59 -0.95,0.95 -1.59,0.95
  region: -1.59,-0.95 -0.95,-0.95 -0.95,-1.59 -1.59,-1.59
  region: -4.13,1.59 -3.49,1.59 -3.49,0.95 -4.13,0.95
  region: -4.13,-0.95 -3.49,-0.95 -3.49,-1.59 -4.13,-1.59
  region: -6.67,1.59 -6.03,1.59 -6.03,0.95 -6.67,0.95
  region: -6.67,-0.95 -6.03,-0.95 -6.03,-1.59 -6.67,-1.59
  region: -9.21,1.59 -8.57,1.59 -8.57,0.95 -9.21,0.95
  region: -9.21,-0.95 -8.57,-0.95 -8.57,-1.59 -9.21,-1.59